# Altium schematic symbol library NT_Miscellaneous.SchLib: 1 symbol
Pins are listed as number, name and electrical type; pins without a type are passive.

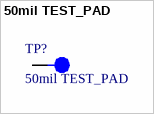
[diagram p0: symbol 50mil TEST_PAD]

## 50mil TEST_PAD
designator TP?
footprint 15mil_TEST_PAD
pins: 1